# Altium footprint library Aquarium_ATO_V1_0.PcbLib: 21 footprints (part 1 of 2)
Each footprint in its own frame and in the unit in brackets; x right, y up, seen from the top. Pads: shape width x height; smd on the part's side, far side on the other; paste and mask are expansions set on the pad; w line width, h text height; cw(c..) or ccw(c..) is an arc to the next point about the centre after c.
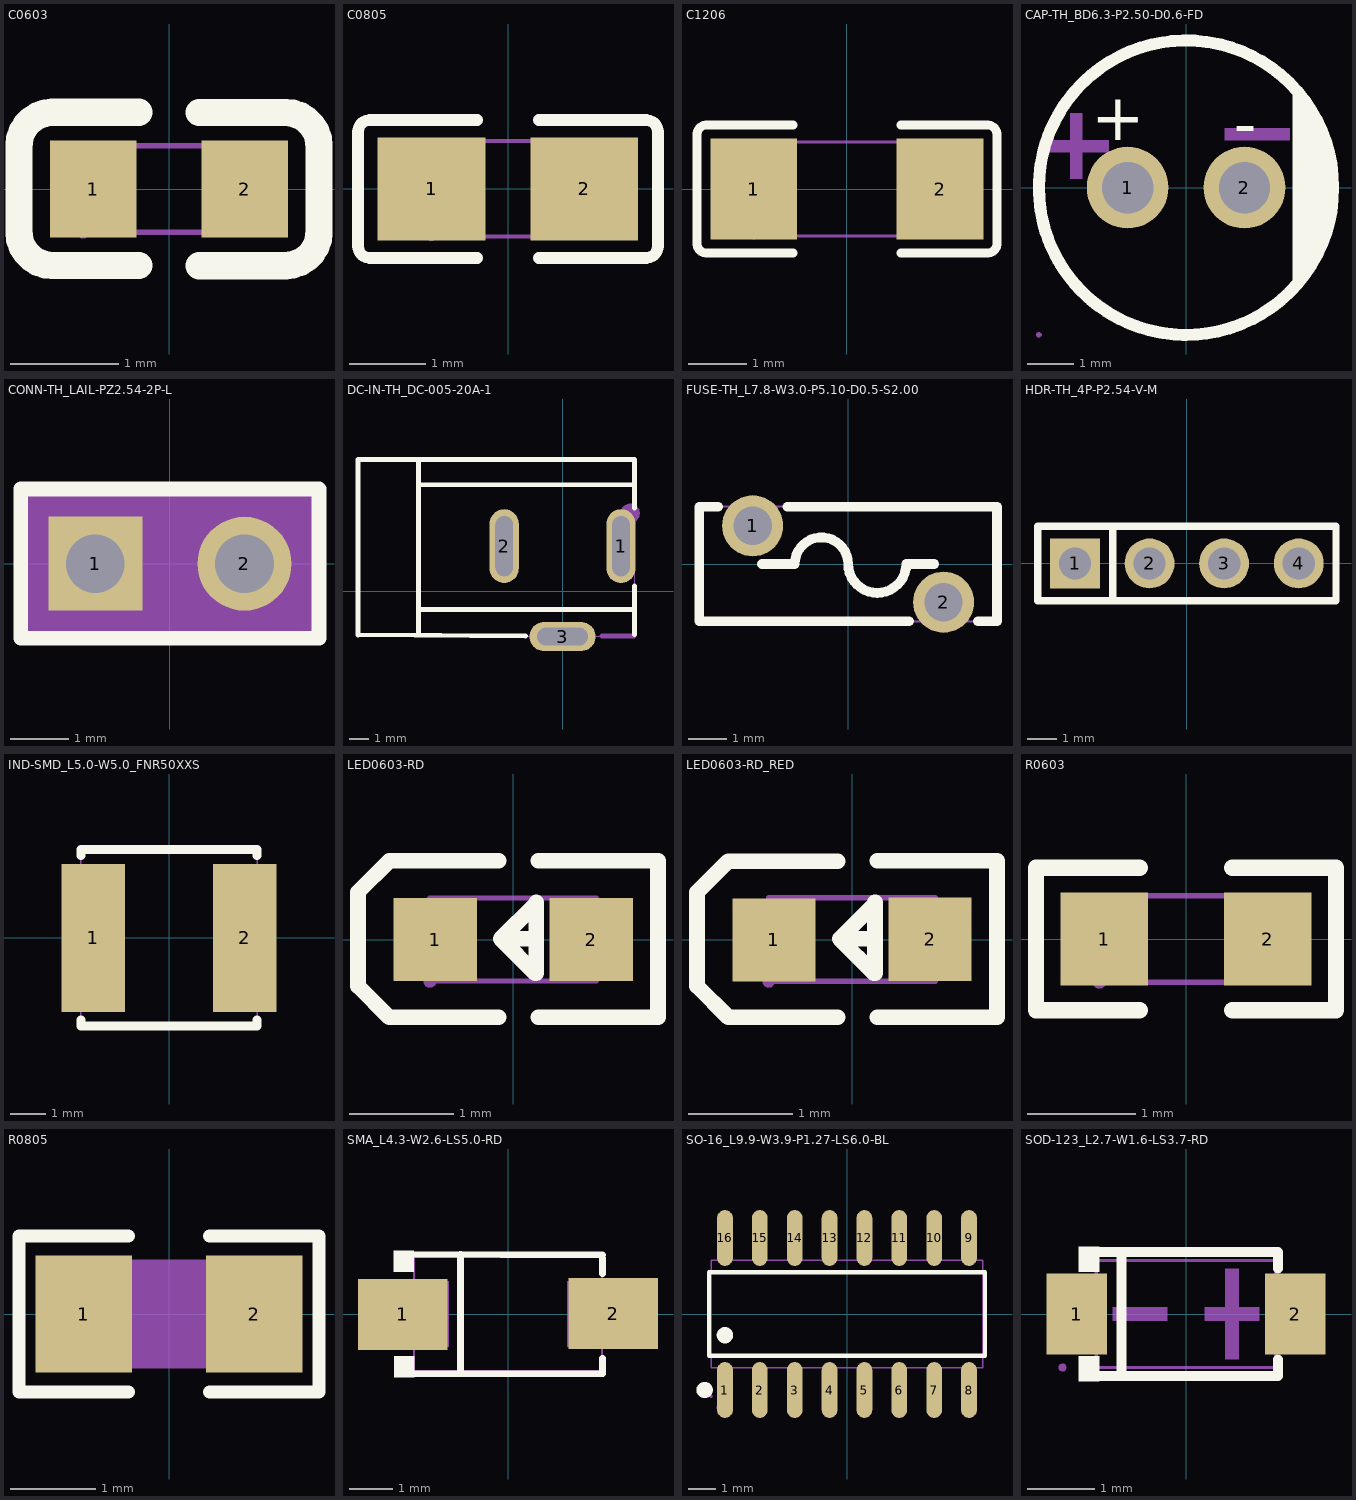
[diagram p0: the footprints below, top view; thin cyan lines are the x and y axes]

## C0603 [mil]
pads (2):
  rect 31.5x35.4 smd: 1(-27.6,0) 2(27.6,0)
Top Overlay:
  lines w10: -11,-27.9 -42.5,-27.9 -45.2,-27.6 -47.8,-26.7 -50.1,-25.3 -52.1,-23.3 -53.5,-21 -54.4,-18.5 -54.7,-15.7 -54.7,15.8 -54.4,18.5 -53.5,21 -52.1,23.4 -50.1,25.3 -47.8,26.7 -45.2,27.7 -42.5,28 -11,28 ; 11,-28 42.5,-28 45.2,-27.6 47.8,-26.7 50.1,-25.3 52.1,-23.4 53.5,-21 54.4,-18.5 54.7,-15.8 54.7,15.7 54.4,18.5 53.5,21 52.1,23.3 50.1,25.3 47.8,26.7 45.2,27.6 42.5,27.9 11,27.9
Mechanical 7:
  lines w2: -31.5,-15.7 31.5,-15.7 31.5,15.7 -31.5,15.7 -31.5,-15.7
Mechanical 8:
  region: -29.1,-15.8 -29.5,-17 -30.5,-17.9 -31.8,-18.1 -33,-17.5 -33.8,-16.4 -33.8,-15.1 -33,-14 -31.8,-13.4 -30.5,-13.6 -29.5,-14.5
Mechanical 9:
  region: 31.5,-15.7 31.5,15.7 19.7,15.7 19.7,-15.7
  region: -31.5,-15.7 -31.5,15.7 -19.7,15.7 -19.7,-15.7

## C0805 [mil]
pads (2):
  rect 55.5x53.1 smd paste-3937 mask+2: 1(-39.4,0) 2(39.3,0)
Top Overlay:
  lines w6: -15.8,-35.6 -71.3,-35.6 -73.2,-35.3 -74.9,-34.5 -76.2,-33.1 -77,-31.5 -77.3,-29.6 -77.3,29.5 -77,31.4 -76.2,33.1 -74.9,34.4 -73.2,35.2 -71.3,35.5 -15.8,35.5 ; 15.8,-35.6 71.3,-35.6 73.1,-35.3 74.8,-34.5 76.1,-33.1 77,-31.5 77.3,-29.6 77.3,29.5 77,31.4 76.1,33.1 74.8,34.4 73.1,35.2 71.3,35.5 15.8,35.5
Top Paste:
  region: -67.2,-25.2 -67.2,25.2 -65.2,27.1 -19.9,27.1 -17.9,25.2 -17.7,9 -35.5,9 -35.5,-8.7 -18.1,-8.7 -17.9,-25.2 -19.9,-27.2 -65.2,-27.2
  region: 67.1,25.2 67.1,-25.2 65.1,-27.2 19.9,-27.2 17.9,-25.2 17.7,-9.1 35.4,-9.1 35.4,8.6 18.1,8.6 17.9,25.2 19.9,27.1 65.1,27.1
Mechanical 7:
  lines w2: -39.4,-24.6 -39.4,24.6 39.3,24.6 39.3,-24.6 -39.4,-24.6
Mechanical 8:
  region: -37,-24.6 -37.4,-25.9 -38.4,-26.8 -39.7,-27 -40.9,-26.4 -41.7,-25.3 -41.7,-24 -40.9,-22.9 -39.7,-22.3 -38.4,-22.5 -37.4,-23.4
Mechanical 9:
  region: -39.4,-24.6 -39.4,24.6 -19.7,24.6 -19.7,-24.6
  region: 39.3,24.6 39.3,-24.6 19.7,-24.6 19.7,24.6

## C1206 [mil]
pads (2):
  rect 58.5x68 smd paste-3937 mask+2: 1(-62.7,0) 2(62.7,0)
Top Overlay:
  lines w6: -36.4,-43 -94.9,-43 -96.7,-42.7 -98.4,-41.9 -99.7,-40.6 -100.6,-38.9 -100.9,-37 -100.9,37 -100.6,38.8 -99.7,40.5 -98.4,41.8 -96.7,42.7 -94.9,43 -36.4,43 ; 36.5,-43 95,-43 96.8,-42.7 98.5,-41.9 99.8,-40.6 100.7,-38.9 101,-37 101,37 100.7,38.8 99.8,40.5 98.5,41.8 96.8,42.7 95,43 36.5,43
Top Paste:
  region: 33.5,-30.1 33.5,-15.5 37.5,-11.6 49.5,-11.6 53.4,-7.6 53.4,7.6 49.5,11.5 37.5,11.5 33.5,15.5 33.5,30.1 37.5,34 88,34 92,30.1 92,-30.1 88,-34 37.5,-34
  region: -33.4,-30.1 -33.4,-15.5 -37.4,-11.6 -49.4,-11.6 -53.3,-7.6 -53.3,7.6 -49.4,11.5 -37.4,11.5 -33.4,15.5 -33.4,30.1 -37.4,34 -87.9,34 -91.9,30.1 -91.9,-30.1 -87.9,-34 -37.4,-34
Mechanical 7:
  lines w2: -62.9,-31.5 -62.9,31.5 63,31.5 63,-31.5 -62.9,-31.5
Mechanical 8:
  region: -60.6,-31.5 -61,-32.8 -62,-33.7 -63.3,-33.9 -64.5,-33.3 -65.2,-32.2 -65.2,-30.9 -64.5,-29.7 -63.3,-29.2 -62,-29.4 -61,-30.2
Mechanical 9:
  region: -62.9,-31.5 -62.9,31.5 -43.3,31.5 -43.3,-31.5
  region: 63,-31.5 63,31.5 43.4,31.5 43.4,-31.5

## CAP-TH_BD6.3-P2.50-D0.6-FD [mil]
pads (2):
  round 68.9 hole 43.3 paste+0 mask+2: 1(-49.2,0) 2(49.2,0)
Top Overlay:
  drawing of 160 lines, arcs and shapes, not listed
  text "-" at 40,35 h39.4
  text "+" at -80,40 h39.4
Mechanical 6:
  region: 32.5,50 87.5,50 87.5,40 32.5,40
  region: -97.5,7.5 -97.5,62.5 -87.5,62.5 -87.5,7.5
  region: -120,40 -65,40 -65,30 -120,30
Mechanical 7:
  lines w2: -0.1,-124.1 0,-124.1 ccw(c0,-0.2) 123.9,-0.2 123.9,0.2 ccw(c0,0.2) 0,124.1 -0.1,124.1 ccw(c-0.1,0.1) -124.1,0.1 -124.1,0 ccw(c-0.1,0) -0.1,-124
Mechanical 8:
  region: -121.7,-124.1 -122.1,-125.3 -123.1,-126.2 -124.4,-126.4 -125.6,-125.8 -126.4,-124.7 -126.4,-123.4 -125.6,-122.3 -124.4,-121.7 -123.1,-121.9 -122.1,-122.8
Mechanical 9:
  region: 61,0 60.7,-2.9 59.6,-5.7 57.8,-8.1 55.5,-10 52.9,-11.2 50,-11.8 47,-11.6 44.2,-10.7 41.7,-9.1 39.7,-6.9 38.2,-4.3 37.5,-1.5 37.5,1.5 38.2,4.3 39.7,6.9 41.7,9.1 44.2,10.7 47,11.6 50,11.8 52.9,11.2 55.5,10 57.8,8.1 59.6,5.7 60.7,2.9
  region: -37.4,0 -37.8,-2.9 -38.9,-5.7 -40.6,-8.1 -42.9,-10 -45.6,-11.2 -48.5,-11.8 -51.4,-11.6 -54.2,-10.7 -56.7,-9.1 -58.8,-6.9 -60.2,-4.3 -60.9,-1.5 -60.9,1.5 -60.2,4.3 -58.8,6.9 -56.7,9.1 -54.2,10.7 -51.4,11.6 -48.5,11.8 -45.6,11.2 -42.9,10 -40.6,8.1 -38.9,5.7 -37.8,2.9

## CONN-TH_LAIL-PZ2.54-2P-L [mil]
pads (2):
  rect 63x63 hole 39.4 paste+0 mask+2: 1(-50,0)
  round 63 hole 39.4 paste+0 mask+2: 2(50,0)
Top Overlay:
  lines w10: -100,-50 100,-50 100,50 -100,50 -100,-50
Mechanical 7:
  region: -100,-49.2 -100,49.2 100,49.2 100,-49.2
Mechanical 8:
  region: -98.8,-49.2 -99.2,-50 -100,-50.4 -100.8,-50 -101.2,-49.2 -100.8,-48.4 -100,-48 -99.2,-48.4
Mechanical 9:
  region: 37.4,12.6 62.6,12.6 62.6,-12.6 37.4,-12.6
  region: -62.6,12.6 -37.4,12.6 -37.4,-12.6 -62.6,-12.6

## DC-IN-TH_DC-005-20A-1 [mil]
pads (3):
  oval 59.1x149.6 hole 35.4 slot 122.1 at 90 deg: 1(118.2,91.5) 2(-118.1,91.5)
  oval 133.9x59.1 hole 35.4 slot 102.4 at 0 deg: 3(0,-91.5)
Top Overlay:
  lines w10: -413.9,-87.9 -413.9,266.4 ; -413.8,-87.8 -75,-90 ; -413.8,266.7 145.9,266.6 ; -291.3,-87.6 -291.3,266.8 ; -288.2,-36.4 145.5,-36.4 ; -288.2,215.6 145.8,215.5 ; 145.7,-87.6 145.7,11.1 ; 145.7,168.1 145.7,266.8
Mechanical 6:
  lines w10: 80,-90 145,-90
  lines w19.7: 126.8,156.5 126.8,159.2 127.5,161.8 128.9,164.1 130.9,165.9 133.3,167.1 135.9,167.7 138.6,167.5 141.1,166.6 143.3,165 145,163 146.1,160.5 146.4,157.9 146.1,155.2 145,152.7 143.3,150.7 141.1,149.1 138.6,148.2 135.9,148 133.3,148.6 130.9,149.8 128.9,151.6 127.5,153.9 126.8,156.5
Mechanical 7:
  lines w2: -413.4,-90.6 145.7,-90.6 145.7,266.8 -413.4,266.8 -413.4,-90.6
Mechanical 8:
  region: 148,266.8 147.7,265.5 146.7,264.6 145.3,264.4 144.1,265 143.4,266.1 143.4,267.4 144.1,268.5 145.3,269.1 146.7,268.9 147.7,268
Mechanical 9:
  region: -49.2,-97.4 -49.2,-85.6 49.2,-85.6 49.2,-97.4
  region: -113.2,42.3 -123,42.3 -123,140.7 -113.2,140.7
  region: 112.2,140.7 124,140.7 124,42.3 112.2,42.3

## FUSE-TH_L7.8-W3.0-P5.10-D0.5-S2.00 [mil]
pads (2):
  round 63 hole 39.4: 1(-98.4,39.4) 2(98.4,-39.4)
Top Overlay:
  lines w10: -133.9,59.1 -153.5,59.1 -153.5,-59 62.9,-59 ; -88.8,0 -55,0 -54.6,4.5 -53.5,8.9 -51.7,13.1 -49.2,16.9 -46.1,20.2 -42.5,23 -38.5,25.2 -34.3,26.7 -29.8,27.4 -25.2,27.4 -20.7,26.7 -16.5,25.2 -12.5,23 -8.9,20.2 -5.8,16.9 -3.3,13.1 -1.5,8.9 -0.4,4.5 0,0 0.4,-4.7 1.5,-9.2 3.3,-13.5 5.8,-17.5 8.9,-21.1 12.4,-24.1 16.4,-26.6 20.8,-28.3 25.3,-29.4 30,-29.8 34.7,-29.4 39.2,-28.3 43.6,-26.6 47.6,-24.1 51.2,-21.1 54.2,-17.5 56.7,-13.5 58.5,-9.2 59.6,-4.7 60,0 88.8,0 ; -62.9,59.1 153.5,59.1 153.5,-59 133.9,-59
Mechanical 7:
  lines w2: -153.5,-59.1 153.5,-59.1 153.5,59.1 -153.5,59.1 -153.5,-59.1
Mechanical 8:
  region: -151.2,59.1 -151.6,57.8 -152.6,56.9 -153.9,56.7 -155.1,57.3 -155.8,58.4 -155.8,59.7 -155.1,60.8 -153.9,61.4 -152.6,61.2 -151.6,60.3
Mechanical 9:
  region: 114.2,-39.4 113.8,-42.9 112.6,-46.2 110.7,-49.2 108.2,-51.7 105.3,-53.6 101.9,-54.7 98.4,-55.1 94.9,-54.7 91.6,-53.6 88.6,-51.7 86.1,-49.2 84.2,-46.2 83.1,-42.9 82.7,-39.4 83.1,-35.9 84.2,-32.5 86.1,-29.6 88.6,-27.1 91.6,-25.2 94.9,-24 98.4,-23.6 101.9,-24 105.3,-25.2 108.2,-27.1 110.7,-29.6 112.6,-32.5 113.8,-35.9
  region: -82.7,39.4 -83.1,35.9 -84.2,32.5 -86.1,29.6 -88.6,27.1 -91.6,25.2 -94.9,24 -98.4,23.6 -101.9,24 -105.3,25.2 -108.2,27.1 -110.7,29.6 -112.6,32.5 -113.8,35.9 -114.2,39.4 -113.8,42.9 -112.6,46.2 -110.7,49.2 -108.2,51.7 -105.3,53.6 -101.9,54.7 -98.4,55.1 -94.9,54.7 -91.6,53.6 -88.6,51.7 -86.1,49.2 -84.2,46.2 -83.1,42.9

## HDR-TH_4P-P2.54-V-M [mil]
pads (4):
  rect 66.9x66.9 hole 43.3: 1(-150,0)
  round 66.9 hole 43.3: 2(-50,0) 3(50,0) 4(150,0)
Top Overlay:
  lines w10: -99.1,-50 -99.1,50 ; -99.1,50 200,50 200,-50 -200,-50 -200,50 -99.1,50
Mechanical 7:
  lines w2: -200,-49.2 -200,49.2 200,49.2 200,-49.2 -200,-49.2
Mechanical 8:
  region: -197.6,-49.2 -198,-50.5 -199,-51.4 -200.3,-51.5 -201.5,-51 -202.3,-49.9 -202.3,-48.5 -201.5,-47.4 -200.3,-46.9 -199,-47.1 -198,-47.9
Mechanical 9:
  region: -162.6,12.6 -137.4,12.6 -137.4,-12.6 -162.6,-12.6
  region: -62.6,12.6 -37.4,12.6 -37.4,-12.6 -62.6,-12.6
  region: 37.4,12.6 62.6,12.6 62.6,-12.6 37.4,-12.6
  region: 137.4,12.6 162.6,12.6 162.6,-12.6 137.4,-12.6

## IND-SMD_L5.0-W5.0_FNR50XXS [mil]
pads (2):
  rect 70.9x165.4 smd: 1(-84.6,0) 2(84.6,0)
Top Overlay:
  lines w10: -98.4,-91.8 -98.4,-98.4 98.4,-98.4 98.4,-91.8 ; -98.4,91.8 -98.4,98.4 98.4,98.4 98.4,91.8
Mechanical 7:
  lines w2: -98.4,-98.4 98.4,-98.4 98.4,98.4 -98.4,98.4 -98.4,-98.4
Mechanical 8:
  region: -96.1,-98.4 -96.4,-99.7 -97.4,-100.6 -98.8,-100.8 -100,-100.2 -100.7,-99.1 -100.7,-97.8 -100,-96.6 -98.8,-96.1 -97.4,-96.3 -96.4,-97.2
Mechanical 9:
  region: -98.4,78.7 -49.2,78.7 -49.2,-78.7 -98.4,-78.7
  region: 98.4,-78.7 49.2,-78.7 49.2,78.7 98.4,78.7

## LED0603-RD [mil]
pads (2):
  rect 31.5x31.5 smd: 1(-29.5,0) 2(29.5,0)
Top Overlay:
  lines w5.9: -5.5,-29.4 -46.8,-29.4 -58.6,-17.6 -58.6,-13.6 -58.6,13.9 -58.6,17.9 -46.8,29.7 -5.5,29.7 ; 8.7,0.3 -4.7,0.3 ; 9.5,-29.3 54.7,-29.3 ; 9.5,29.8 54.7,29.8 54.7,-28.5 ; -4.7,0.3 8.3,-12.7 8.7,-12.7 8.7,14 8.7,13.6 -4.7,0.3
Mechanical 6:
  region: -42.1,2.4 -20.9,2.4 -20.9,-2.7 -42.1,-2.7
  region: 28.9,-10.5 28.9,10.7 34,10.7 34,-10.5
  region: 20.8,2.7 42.1,2.7 42.1,-2.4 20.8,-2.4
Mechanical 7:
  lines w2: -31.5,-15.7 -31.5,15.7 31.5,15.7 31.5,-15.7 -31.5,-15.7
Mechanical 8:
  region: -29.1,-15.9 -29.5,-17.2 -30.5,-18 -31.8,-18.2 -33,-17.7 -33.7,-16.6 -33.7,-15.2 -33,-14.1 -31.8,-13.5 -30.5,-13.7 -29.5,-14.6
Mechanical 9:
  region: -31.5,-15.9 -31.5,15.6 -19.7,15.6 -19.7,-15.9
  region: 19.7,-15.6 19.7,15.9 31.5,15.9 31.5,-15.6

## LED0603-RD_RED [mil]
pads (2):
  rect 31.5x31.5 smd: 1(-29.5,-0.1) 2(29.5,0.2)
Top Overlay:
  lines w5.9: -5.5,-29.3 -46.8,-29.3 -58.6,-17.5 -58.6,-13.6 -58.6,14 -58.6,17.9 -46.8,29.7 -5.5,29.7 ; 8.7,0.3 -4.7,0.3 ; 9.5,-29.3 54.8,-29.3 ; 9.5,29.8 54.8,29.8 54.8,-28.5 ; -4.7,0.3 8.3,-12.7 8.7,-12.7 8.7,14.1 8.7,13.7 -4.7,0.3
Mechanical 6:
  region: 20.8,2.7 42.1,2.7 42.1,-2.4 20.8,-2.4
  region: 28.9,-10.5 28.9,10.8 34.1,10.8 34.1,-10.5
  region: -42.1,2.4 -20.8,2.4 -20.8,-2.7 -42.1,-2.7
Mechanical 7:
  lines w2: -31.5,-15.7 -31.5,15.8 31.5,15.8 31.5,-15.7 -31.5,-15.7
Mechanical 8:
  region: -29.1,-15.9 -29.5,-17.1 -30.5,-18 -31.8,-18.2 -33,-17.6 -33.7,-16.5 -33.7,-15.2 -33,-14.1 -31.8,-13.5 -30.5,-13.7 -29.5,-14.6
Mechanical 9:
  region: 19.7,-15.6 19.7,15.9 31.5,15.9 31.5,-15.6
  region: -31.5,-15.9 -31.5,15.6 -19.6,15.6 -19.6,-15.9

## R0603 [mil]
pads (2):
  rect 31.8x34 smd paste-3937 mask+2: 1(-29.7,0) 2(29.6,0)
Top Overlay:
  lines w6: -16.8,-26 -54.6,-26 -54.6,26 -16.8,26 ; 16.7,-26 54.5,-26 54.5,26 16.7,26
Top Paste:
  region: 47,17.7 15.5,17.7 13.6,15.7 13.6,6.8 28.1,6.8 28.1,-6.2 13.6,-6.2 13.6,-15.8 15.5,-17.7 47,-17.7 49,-15.8 49,15.7
  region: -47.1,-17.7 -15.6,-17.7 -13.6,-15.8 -13.6,-6.8 -28.2,-6.8 -28.2,6.2 -13.6,6.2 -13.6,15.7 -15.6,17.7 -47.1,17.7 -49,15.7 -49,-15.8
Mechanical 7:
  lines w2: -31.5,-15.8 -31.5,15.7 31.5,15.7 31.5,-15.8 -31.5,-15.8
Mechanical 8:
  region: -29.2,-15.8 -29.5,-17 -30.6,-17.9 -31.9,-18.1 -33.1,-17.5 -33.8,-16.4 -33.8,-15.1 -33.1,-14 -31.9,-13.4 -30.6,-13.6 -29.5,-14.5
Mechanical 9:
  region: -31.5,-15.8 -31.5,15.7 -19.7,15.7 -19.7,-15.8
  region: 31.5,-15.8 31.5,15.7 19.7,15.7 19.7,-15.8

## R0805 [mil]
pads (2):
  rect 44.6x54.2 smd paste-3937 mask+2: 1(-39.4,0) 2(39.4,0)
Top Overlay:
  lines w6: -18.7,-36.1 -69.3,-36.1 -69.3,36.1 -18.7,36.1 ; 18.7,-36.1 69.3,-36.1 69.3,36.1 18.7,36.1
Top Paste:
  region: -66.9,-25.2 -66.9,25.2 -65,27.2 -19.7,27.2 -17.7,25.2 -17.5,9.1 -35.2,9.1 -35.2,-8.7 -17.9,-8.7 -17.7,-25.2 -19.7,-27.2 -65,-27.2
  region: 17.7,-25.2 17.7,-8.7 35.2,-8.7 35.2,9.1 17.9,9.1 17.7,25.2 19.7,27.2 65,27.2 66.9,25.2 66.9,-25.2 65,-27.2 19.7,-27.2
Mechanical 7:
  region: -39.4,-25.1 -39.4,25.1 39.4,25.1 39.4,-25.1
Mechanical 8:
  region: -38.2,-25.1 -38.5,-25.9 -39.4,-26.3 -40.2,-25.9 -40.5,-25.1 -40.2,-24.3 -39.4,-23.9 -38.5,-24.3
Mechanical 9:
  region: -39.4,-25.1 -39.4,25.1 -23.6,25.1 -23.6,-25.1
  region: 39.4,-25.1 39.4,25.1 23.6,25.1 23.6,-25.1

## SMA_L4.3-W2.6-LS5.0-RD [mil]
pads (2):
  rect 80.6x63.8 smd: 1(-94.6,-0.4) 2(94.6,0.4)
Top Overlay:
  region: -84.9,56.7 -84.9,37.9 -102.9,37.9 -102.9,56.7
  region: -84.4,-56.7 -84.4,-37.9 -102.4,-37.9 -102.4,-56.7
  lines w6: -99.4,53.7 85,53 ; -98.6,-53.7 85.2,-53.7 ; -42.7,-53.7 -42.7,53.7 ; 85,-53.7 85,-39.9 ; 85,36.2 85,50
Mechanical 6:
  region: -95.7,-3.8 -95.7,3.8 -65.3,3.8 -65.3,-3.8
  region: 95.7,-3.8 95.7,3.8 65.3,3.8 65.3,-3.8
  region: 84.3,-25.3 84.3,25.3 76.7,25.3 76.7,-25.3
Mechanical 7:
  lines w2: -84.6,-51.2 -84.6,51.2 84.6,51.2 84.6,-51.2 -84.6,-51.2
Mechanical 8:
  region: -96.1,-51.2 -96.4,-52.5 -97.4,-53.3 -98.8,-53.5 -100,-53 -100.7,-51.8 -100.7,-50.5 -100,-49.4 -98.8,-48.8 -97.4,-49 -96.4,-49.9
Mechanical 9:
  region: 98.4,-29.5 98.4,29.5 53.5,29.5 53.5,-29.5
  region: -98.4,29.5 -98.4,-29.5 -53.5,-29.5 -53.5,29.5

## SO-16_L9.9-W3.9-P1.27-LS6.0-BL [mil]
pads (16):
  oval 22.6x80.2 smd: 1(-175,-109) 2(-125,-109) 3(-75,-109) 4(-25,-109) 5(25,-109) 6(75,-109) 7(125,-109) 8(175,-109) 9(175,109) 10(125,109) 11(75,109) 12(25,109) 13(-25,109) 14(-75,109) 15(-125,109) 16(-175,109)
Top Overlay:
  lines w6: -197.9,-59.9 -197.9,59.9 197.9,59.9 197.9,-59.9 -197.9,-59.9
  lines w11.8: -210,-109 -209.7,-111 -208.6,-112.8 -207.1,-114.1 -205.1,-114.8 -203.1,-114.8 -201.2,-114.1 -199.6,-112.8 -198.6,-111 -198.2,-109 -198.6,-107 -199.6,-105.2 -201.2,-103.9 -203.1,-103.2 -205.1,-103.2 -207.1,-103.9 -208.6,-105.2 -209.7,-107 -210,-109 ; -180.9,-30.3 -180.6,-32.3 -179.5,-34.1 -178,-35.4 -176,-36.1 -174,-36.1 -172,-35.4 -170.5,-34.1 -169.4,-32.3 -169.1,-30.3 -169.4,-28.3 -170.5,-26.5 -172,-25.2 -174,-24.5 -176,-24.5 -178,-25.2 -179.5,-26.5 -180.6,-28.3 -180.9,-30.3
Mechanical 6:
  lines w11.8: -180.9,-133.9 -180.6,-135.9 -179.5,-137.7 -178,-139 -176,-139.7 -174,-139.7 -172,-139 -170.5,-137.7 -169.4,-135.9 -169.1,-133.9 -169.4,-131.8 -170.5,-130.1 -172,-128.7 -174,-128 -176,-128 -178,-128.7 -179.5,-130.1 -180.6,-131.8 -180.9,-133.9
Mechanical 7:
  lines w2: -194.9,-76.8 -194.9,76.8 194.9,76.8 194.9,-76.8 -194.9,-76.8
Mechanical 8:
  region: -192.5,-118.1 -192.9,-119.4 -193.9,-120.3 -195.2,-120.4 -196.4,-119.9 -197.1,-118.8 -197.1,-117.4 -196.4,-116.3 -195.2,-115.8 -193.9,-116 -192.9,-116.8
Mechanical 9:
  region: -183.5,-118.1 -183.5,-92.5 -166.5,-92.5 -166.5,-118.1
  region: -133.5,-118.1 -133.5,-92.5 -116.5,-92.5 -116.5,-118.1
  region: -83.5,-118.1 -83.5,-92.5 -66.5,-92.5 -66.5,-118.1
  region: -33.5,-118.1 -33.5,-92.5 -16.5,-92.5 -16.5,-118.1
  region: 16.5,-118.1 16.5,-92.5 33.5,-92.5 33.5,-118.1
  region: 66.5,-118.1 66.5,-92.5 83.5,-92.5 83.5,-118.1
  region: 116.5,-118.1 116.5,-92.5 133.5,-92.5 133.5,-118.1
  region: 166.5,-118.1 166.5,-92.5 183.5,-92.5 183.5,-118.1
  region: -183.5,92.5 -183.5,118.1 -166.5,118.1 -166.5,92.5
  region: -133.5,92.5 -133.5,118.1 -116.5,118.1 -116.5,92.5
  region: -83.5,92.5 -83.5,118.1 -66.5,118.1 -66.5,92.5
  region: -33.5,92.5 -33.5,118.1 -16.5,118.1 -16.5,92.5
  region: 16.5,92.5 16.5,118.1 33.5,118.1 33.5,92.5
  region: 66.5,92.5 66.5,118.1 83.5,118.1 83.5,92.5
  region: 116.5,92.5 116.5,118.1 133.5,118.1 133.5,92.5
  region: 166.5,92.5 166.5,118.1 183.5,118.1 183.5,92.5
Mechanical 10:
  region: -183.5,-92.9 -183.5,-76.4 -166.5,-76.4 -166.5,-92.9
  region: -133.5,-92.9 -133.5,-76.4 -116.5,-76.4 -116.5,-92.9
  region: -83.5,-92.9 -83.5,-76.4 -66.5,-76.4 -66.5,-92.9
  region: -33.5,-92.9 -33.5,-76.4 -16.5,-76.4 -16.5,-92.9
  region: 16.5,-92.9 16.5,-76.4 33.5,-76.4 33.5,-92.9
  region: 66.5,-92.9 66.5,-76.4 83.5,-76.4 83.5,-92.9
  region: 116.5,-92.9 116.5,-76.4 133.5,-76.4 133.5,-92.9
  region: 166.5,-92.9 166.5,-76.4 183.5,-76.4 183.5,-92.9
  region: -183.5,76.4 -183.5,92.9 -166.5,92.9 -166.5,76.4
  region: -133.5,76.4 -133.5,92.9 -116.5,92.9 -116.5,76.4
  region: -83.5,76.4 -83.5,92.9 -66.5,92.9 -66.5,76.4
  region: -33.5,76.4 -33.5,92.9 -16.5,92.9 -16.5,76.4
  region: 16.5,76.4 16.5,92.9 33.5,92.9 33.5,76.4
  region: 66.5,76.4 66.5,92.9 83.5,92.9 83.5,76.4
  region: 116.5,76.4 116.5,92.9 133.5,92.9 133.5,76.4
  region: 166.5,76.4 166.5,92.9 183.5,92.9 183.5,76.4

## SOD-123_L2.7-W1.6-LS3.7-RD [mil]
pads (2):
  rect 35.8x48 smd: 1(-64.4,0) 2(64.4,0)
Top Overlay:
  region: -51.2,-39.5 -51.2,-24.9 -63.2,-24.9 -63.2,-39.5
  region: -51.2,39.5 -51.2,24.9 -63.2,24.9 -63.2,39.5
  lines w6: -54.2,-36.5 54.2,-36.5 54.2,-26.9 ; -54.2,36.5 54.2,36.5 54.2,26.9 ; -38.1,-36.5 -38.1,36.5
Mechanical 6:
  region: 31.1,26.8 31.1,-26.8 23.1,-26.8 23.1,26.8
  region: 43.2,4 43.2,-4 11,-4 11,4
  region: -43.2,4 -43.2,-4 -11,-4 -11,4
Mechanical 7:
  lines w2: -53,-31.5 53,-31.5 53,31.5 -53,31.5 -53,-31.5
Mechanical 8:
  region: -70.5,-31.5 -70.8,-32.8 -71.8,-33.6 -73.2,-33.8 -74.4,-33.3 -75.1,-32.2 -75.1,-30.8 -74.4,-29.7 -73.2,-29.2 -71.8,-29.4 -70.8,-30.2
Mechanical 9:
  region: 62.8,11.8 72.6,11.8 72.6,-11.8 62.8,-11.8
  region: -72.6,11.8 -62.8,11.8 -62.8,-11.8 -72.6,-11.8
Mechanical 10:
  region: -71.3,-11.8 -52.4,-11.8 -52.4,11.8 -71.3,11.8
  region: 71.3,11.8 52.4,11.8 52.4,-11.8 71.3,-11.8